# Altium schematic symbol library XGL5050-152MEC.SchLib: 1 symbol
Pins are listed as number, name and electrical type; pins without a type are passive.

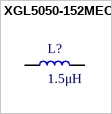
[diagram p0: symbol XGL5050-152MEC]

## XGL5050-152MEC
designator L?, comment 1.5μH
1.5 µH Shielded Molded Inductor 17.1 A 5.7mOhm Max Nonstandard
footprint XGL5050
pins: 1, 2